# EAGLE library part STM32L431RCT6TR (library Demo_Board.bound3)
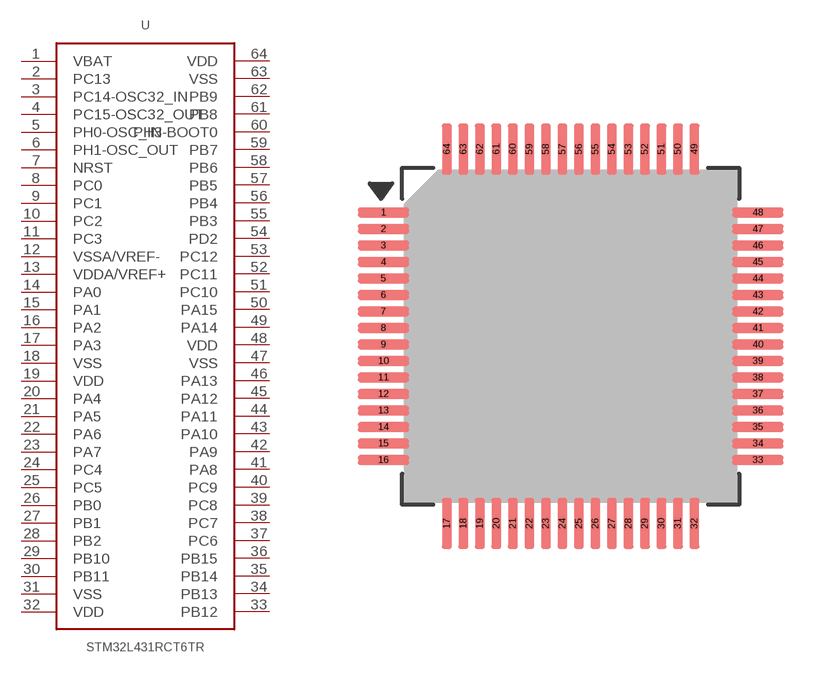
[diagram p2: symbol with the pads of LQFP-64_10x10mm_P0.5mm; footprint LQFP-64_10x10mm_P0.5mm]

Designator prefix U

## STM32L431RCT6TR  [LQFP-64_10x10mm_P0.5mm]
1  VBAT  pwr
2  PC13
3  PC14-OSC32_IN
4  PC15-OSC32_OUT
5  PH0-OSC_IN
6  PH1-OSC_OUT
7  NRST
8  PC0
9  PC1
10  PC2
11  PC3
12  VSSA/VREF-  pwr
13  VDDA/VREF+  pwr
14  PA0
15  PA1
16  PA2
17  PA3
18  VSS  pwr
19  VDD  pwr
20  PA4
21  PA5
22  PA6
23  PA7
24  PC4
25  PC5
26  PB0
27  PB1
28  PB2
29  PB10
30  PB11
31  VSS  pwr
32  VDD  pwr
33  PB12
34  PB13
35  PB14
36  PB15
37  PC6
38  PC7
39  PC8
40  PC9
41  PA8
42  PA9
43  PA10
44  PA11
45  PA12
46  PA13
47  VSS  pwr
48  VDD  pwr
49  PA14
50  PA15
51  PC10
52  PC11
53  PC12
54  PD2
55  PB3
56  PB4
57  PB5
58  PB6
59  PB7
60  PH3-BOOT0
61  PB8
62  PB9
63  VSS  pwr
64  VDD  pwr

## Footprint LQFP-64_10x10mm_P0.5mm (pad centres in mm)
LQFP-64, 10 x 10 mm, 0.5 mm pitch
smd 1.55 x 0.3: 1 -5.675,3.75; 2 -5.675,3.25; 3 -5.675,2.75; 4 -5.675,2.25; 5 -5.675,1.75; 6 -5.675,1.25; 7 -5.675,0.75; 8 -5.675,0.25; 9 -5.675,-0.25; 10 -5.675,-0.75; 11 -5.675,-1.25; 12 -5.675,-1.75; 13 -5.675,-2.25; 14 -5.675,-2.75; 15 -5.675,-3.25; 16 -5.675,-3.75; 33 5.675,-3.75; 34 5.675,-3.25; 35 5.675,-2.75; 36 5.675,-2.25; 37 5.675,-1.75; 38 5.675,-1.25; 39 5.675,-0.75; 40 5.675,-0.25; 41 5.675,0.25; 42 5.675,0.75; 43 5.675,1.25; 44 5.675,1.75; 45 5.675,2.25; 46 5.675,2.75; 47 5.675,3.25; 48 5.675,3.75
smd 0.3 x 1.55: 17 -3.75,-5.675; 18 -3.25,-5.675; 19 -2.75,-5.675; 20 -2.25,-5.675; 21 -1.75,-5.675; 22 -1.25,-5.675; 23 -0.75,-5.675; 24 -0.25,-5.675; 25 0.25,-5.675; 26 0.75,-5.675; 27 1.25,-5.675; 28 1.75,-5.675; 29 2.25,-5.675; 30 2.75,-5.675; 31 3.25,-5.675; 32 3.75,-5.675; 49 3.75,5.675; 50 3.25,5.675; 51 2.75,5.675; 52 2.25,5.675; 53 1.75,5.675; 54 1.25,5.675; 55 0.75,5.675; 56 0.25,5.675; 57 -0.25,5.675; 58 -0.75,5.675; 59 -1.25,5.675; 60 -1.75,5.675; 61 -2.25,5.675; 62 -2.75,5.675; 63 -3.25,5.675; 64 -3.75,5.675